# Altium footprint library NX32F001T-塑料壳扳手角磨链锯通用.PcbLib: 21 footprints (part 1 of 2)
Each footprint in its own frame and in the unit in brackets; x right, y up, seen from the top. Pads: shape width x height; smd on the part's side, far side on the other; paste and mask are expansions set on the pad; w line width, h text height; cw(c..) or ccw(c..) is an arc to the next point about the centre after c.
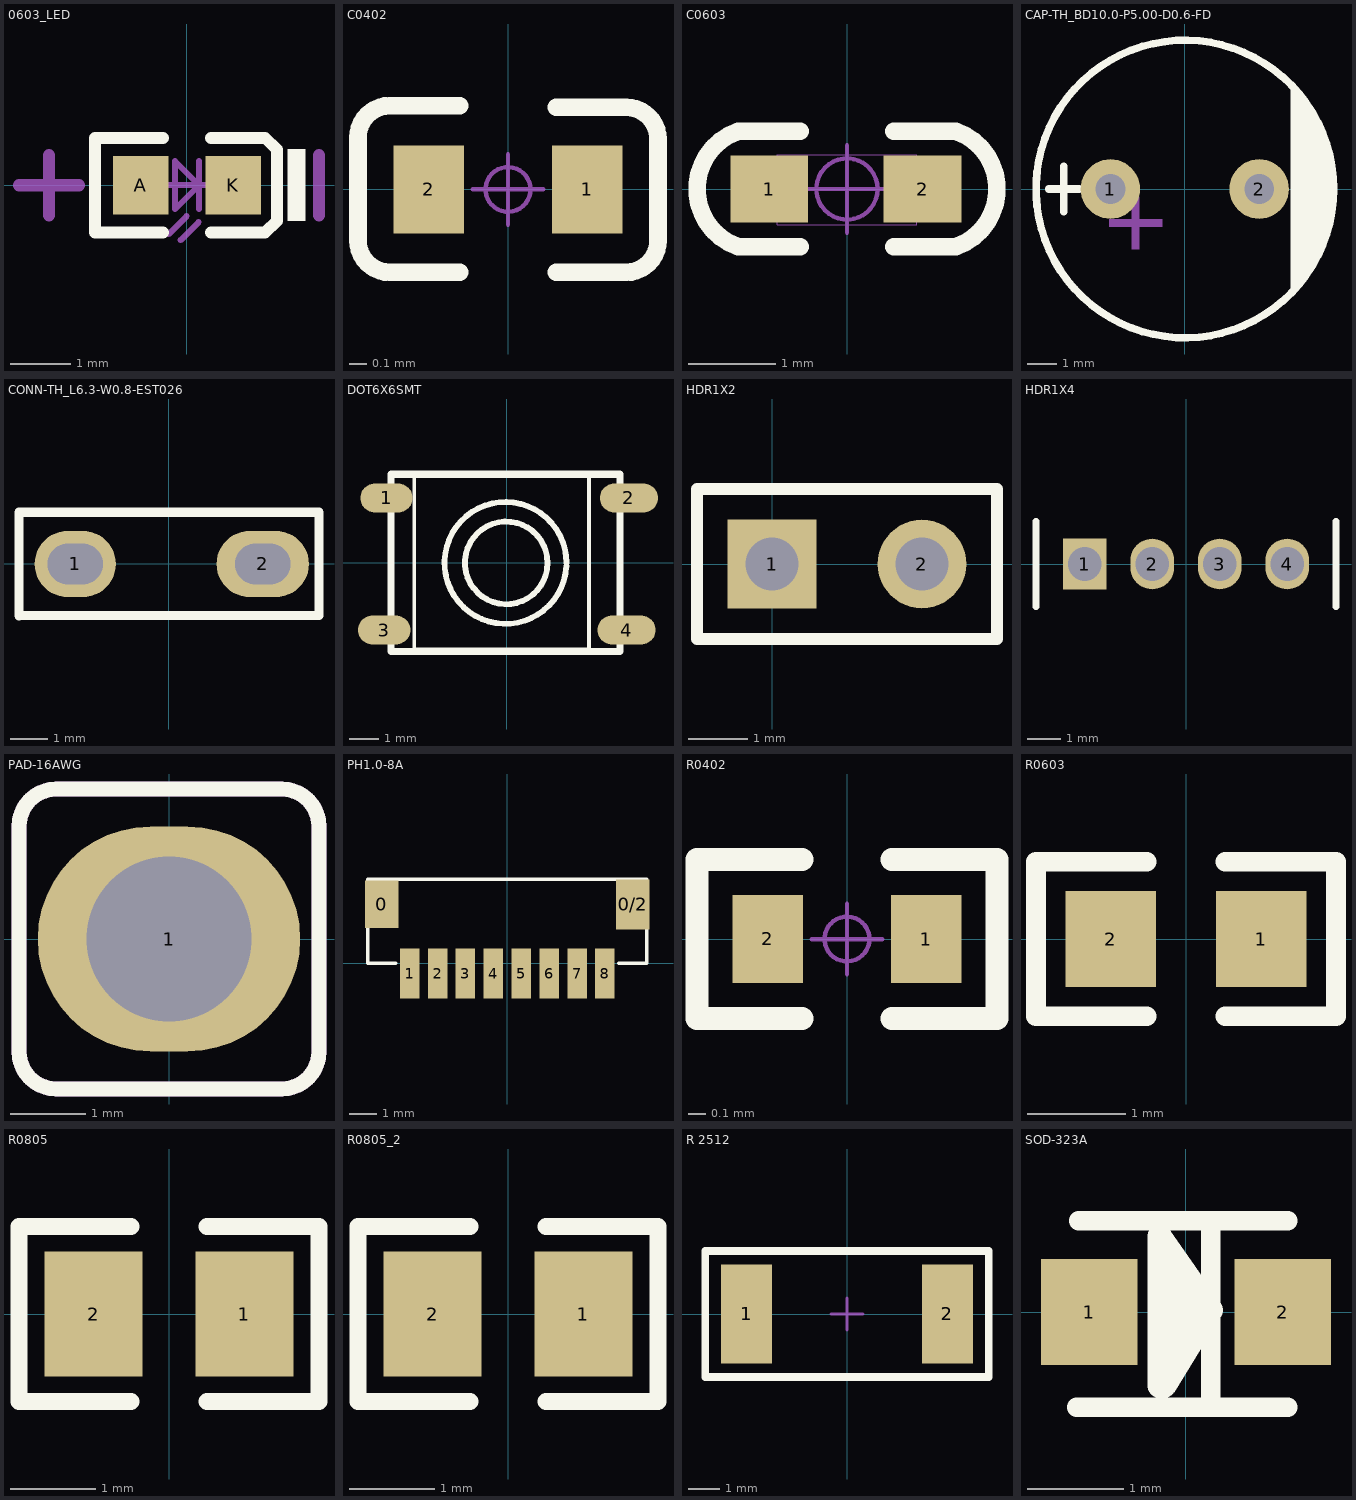
[diagram p0: the footprints below, top view; thin cyan lines are the x and y axes]

## 0603_LED [mm]
height 0.9
pads (2):
  rect 0.93x0.98 smd: A(-0.77,0) K(0.77,0)
Top Overlay:
  region: 1.975,0.6 1.675,0.6 1.675,-0.6 1.975,-0.6
  lines w0.2: -0.4,-0.79 -1.535,-0.79 -1.535,0.79 -0.4,0.79 ; 0.4,-0.79 1.3,-0.79 1.5,-0.597 1.5,0.597 1.3,0.79 0.4,0.79
Mechanical 13:
  lines w0.1: -0.4,0 0.4,0 ; -0.305,-0.817 -0.005,-0.517 ; -0.105,-0.917 0.195,-0.617 ; 0.2,-0.4 0.2,0.4 ; -0.2,-0.4 0.2,0 -0.2,0.4 -0.2,-0.4
Mechanical 15:
  lines w0.203: -2.8,0 -1.8,0 ; -2.3,-0.5 -2.3,0.5 ; 2.2,-0.5 2.2,0.5
3D body "User Library-LED_0603_R.STEP": height 0.6, standoff 0, extent -0.8,-0.4 0.8,0.4

## C0402 [mm]
height 6
pads (2):
  rect 0.4x0.5 smd: 1(0.45,0) 2(-0.45,0)
Top Overlay:
  lines w0.1: -0.274,-0.47 -0.67,-0.47 cw(c-0.67,-0.29) -0.85,-0.29 -0.85,0.295 cw(c-0.67,0.295) -0.67,0.475 -0.274,0.475 ; 0.274,-0.47 0.67,-0.47 ccw(c0.67,-0.29) 0.85,-0.29 0.85,0.285 ccw(c0.67,0.285) 0.67,0.465 0.274,0.465
Mechanical 16:
  circle w0.025: c0,0 r0.127
  lines w0.025: -0.2,0 0.2,0 ; 0,-0.2 0,0.2

## C0603 [mil] "无极性贴片电容"
pads (2):
  rect 35x30 smd: 1(-35,0) 2(34,0)
Top Overlay:
  lines w7.87: -21,-26 -49.02,-26 cw(c-40,0) -49.02,26 -21,26 ; 21,-26 49.02,-26 ccw(c40,0) 49.02,26 21,26
Mechanical 13:
  lines w0.39: -31.5,-16 -31.5,15.5 31.5,15.5 31.5,-16 -31.5,-16
Mechanical 15:
  circle w1.97: c0,0 r13.78
  lines w1.97: -19.68,0 19.68,0 ; 0,-19.68 0,19.68
3D body "C 0603.STEP": height 31.89, standoff -0.39, extent -31.5,-16.14 31.5,16.14

## CAP-TH_BD10.0-P5.00-D0.6-FD [mm]
height 0.9
pads (2):
  round 2 hole 1: 1(-2.5,0) 2(2.5,0)
Top Overlay:
  circle w0.254: c0,0 r5
  region: 3.556,3.556 3.556,-3.556 4.318,-2.54 4.826,-1.016 5.08,0.508 4.826,1.524
  lines w0.254: -4.572,0 -3.556,0 ; -4.064,-0.762 -4.064,0.762
Mechanical 15:
  region: -1.778,-2.032 -1.524,-2.032 -1.524,-0.254 -1.778,-0.254
  region: -2.54,-1.016 -0.762,-1.016 -0.762,-1.27 -2.54,-1.27

## CONN-TH_L6.3-W0.8-EST026 [mm]
height 0.9
pads (2):
  oval 2.2x1.8 hole 1.1 slot 1.5 at 0 deg: 1(-2.54,0)
  oval 2.5x1.8 hole 1.1 slot 1.5 at 0 deg: 2(2.54,0)
Top Overlay:
  lines w0.254: -4.064,-1.397 4.064,-1.397 4.064,1.397 -4.064,1.397 -4.064,-1.397

## DOT6X6SMT [mm]
height 1.4
pads (4):
  oval 1.8x1 smd: 1(-4.13,2.22) 3(-4.21,-2.32)
  oval 2x1 smd: 2(4.2,2.22) 4(4.12,-2.32)
Top Overlay:
  circle w0.2: c-0.016,-0.013 r1.42
  lines w0.127: -3.173,-2.987 -3.173,3.013 2.827,3.013 2.827,-2.987 -3.173,-2.987
  lines w0.2: 2.05,-0.129 cw(c-0.041,-0.013) 2.053,-0.013
  lines w0.25: -3.978,-3.061 -3.978,3.035 3.896,3.035 3.896,-3.061 -3.978,-3.061

## HDR1X2 [mm] "Connector; Header; 2 Position"
height 6
pads (2):
  rect 1.5x1.5 hole 0.9: 1(0,0)
  round 1.5 hole 0.9: 2(2.54,0)
Top Overlay:
  lines w0.2: -1.27,-1.27 -1.27,1.27 3.81,1.27 3.81,-1.27 -1.27,-1.27

## HDR1X4 [mm] "Connector; Header; 4 Position"
height 0.9
pads (4):
  rect 1.3x1.5 hole 1: 1(-3,0)
  oval 1.3x1.5 hole 1: 2(-1,0) 3(1,0) 4(3,0)
Top Overlay:
  lines w0.2: -4.445,-1.27 -4.445,1.27 ; 4.445,-1.27 4.445,1.27

## PAD-16AWG [mm] "PTH for 16 AWG wire"
height 1.6
pads (1):
  oval 3.5x3 hole 2.2: 1(0,0)
Top Overlay:
  lines w0.2: -2,-1.5 ccw(c-1.5,-1.5) -1.5,-2 1.5,-2 ccw(c1.5,-1.5) 2,-1.5 2,1.5 ccw(c1.5,1.5) 1.5,2 -1.5,2 ccw(c-1.5,1.5) -2,1.5 -2,-1.5
Mechanical 15:
  lines w0.2: -2,-1.5 ccw(c-1.5,-1.5) -1.5,-2 1.5,-2 ccw(c1.5,-1.5) 2,-1.5 2,1.5 ccw(c1.5,1.5) 1.5,2 -1.5,2 ccw(c-1.5,1.5) -2,1.5 -2,-1.5
3D body "wire2.STEP": height 14.89, standoff -2, extent -0.589,-0.518 3.544,0.482

## PH1.0-8A [mm]
height 19.1
pads (10):
  rect 1.2x1.7 smd: 0(-4.5,2.1)
  rect 1.2x1.8 smd: 0/2(4.5,2.1)
  rect 0.7x1.8 smd: 1(-3.5,-0.375) 2(-2.5,-0.375) 3(-1.5,-0.375) 4(-0.5,-0.375) 5(0.5,-0.375) 6(1.5,-0.375) 7(2.5,-0.375) 8(3.5,-0.375)
Top Overlay:
  lines w0.127: -4,0 -5,0 -5,3 5,3 5,0 4,0 ; -4,3 4,3

## R0402 [mm]
height 6
pads (2):
  rect 0.4x0.5 smd: 1(0.45,0) 2(-0.45,0)
Top Overlay:
  lines w0.13: -0.254,-0.45 -0.85,-0.45 -0.85,0.45 -0.254,0.45 ; 0.254,-0.45 0.85,-0.45 0.85,0.45 ; 0.254,0.45 0.85,0.45 ; 0.85,0.45 0.85,0.45
Mechanical 16:
  circle w0.025: c0,0 r0.127
  lines w0.025: -0.2,0 0.2,0 ; 0,-0.2 0,0.2

## R0603 [mm]
height 1.25
pads (2):
  rect 0.93x0.98 smd: 1(0.77,0) 2(-0.77,0)
Top Overlay:
  lines w0.2: -0.4,-0.79 -1.535,-0.79 -1.535,0.79 -0.4,0.79 ; 0.4,-0.79 1.535,-0.79 1.535,0.79 0.4,0.79
3D body "User Library-RES_1609-0603.STEP": height 0.56, standoff 0, extent -0.85,-0.4 0.85,0.4

## R0805 [mm]
height 6
pads (2):
  rect 1.16x1.47 smd: 1(0.89,0) 2(-0.89,0)
Top Overlay:
  lines w0.2: -0.45,-1.035 -1.77,-1.035 -1.77,1.035 -0.45,1.035 ; 0.45,-1.035 1.77,-1.035 1.77,1.035 0.45,1.035
3D body "User Library-R_0805.STEP": height 0.49, standoff -0.01, extent -1.003,-0.625 0.997,0.625

## R0805_2 [mm]
pads (2):
  rect 1.16x1.47 smd: 1(0.89,0) 2(-0.89,0)
Top Overlay:
  lines w0.2: -0.45,-1.035 -1.77,-1.035 -1.77,1.035 -0.45,1.035 ; 0.45,-1.035 1.77,-1.035 1.77,1.035 0.45,1.035
3D body "User Library-R_0805.STEP": height 0.49, standoff -0.01, extent -1.003,-0.625 0.997,0.625

## R 2512 [mm] "1W贴片电阻"
height 0.9
pads (2):
  rect 1.65x3.2 smd: 1(-3.24,0) 2(3.24,0)
Top Overlay:
  lines w0.254: -4.572,-2.032 4.572,-2.032 4.572,2.032 -4.572,2.032 -4.572,-2.032
Mechanical 15:
  lines w0.1: -0.508,0 0.508,0 ; 0,-0.508 0,0.508
3D body "R 2512.STEP": height 0.55, standoff -0.02, extent -3.2,-1.6 3.2,1.6

## SOD-323A [mm]
height 0.9
pads (2):
  rect 1x1.1 smd: 1(-1.003,0) 2(1.003,0)
Top Overlay:
  region: 0.17,0.325 -0.27,0.325 -0.27,-0.305 0.17,-0.305
  region: 0.042,0.548 -0.272,0.548 -0.272,-0.489 0.042,-0.489
  lines w0.2: -1.133,-0.985 -0.673,-0.985 0.747,-0.985 1.057,-0.985 ; -1.113,0.945 -0.673,0.945 0.707,0.945 1.057,0.945 ; 0.256,-0.97 0.256,0.935
  lines w0.254: -0.269,-0.765 -0.229,-0.765 0.256,0.021 -0.269,0.775 -0.269,0.785 -0.269,-0.765